# Altium schematic symbol library SMMS0420-4R7M.SchLib: 1 symbol
Pins are listed as number, name and electrical type; pins without a type are passive.

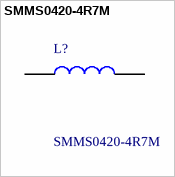
[diagram p0: symbol SMMS0420-4R7M]

## SMMS0420-4R7M
designator L?
2.5A 4.7uH 3A 126m +/-20% SMD,4.6x4.2mm Fixed Inductors RoHS; Manufacturer_Name: Shun Xiang Nuo Elec; Geometry.Height: 2mm; Manufacturer_Part_Number: SMMS0420-4R7M; Mouser Part Number: *; Mouser Price/Stock: *; Arrow Part Number: *; Arrow Price/Stock: *; Datasheet Link: https://www.lcsc.com/datasheet/C133193.pdf
footprint SMMS04204R7M
pins: 1 +, 2 -